# Altium schematic symbol library 2450AT18D0100001E.SchLib: 1 symbol
Pins are listed as number, name and electrical type; pins without a type are passive.

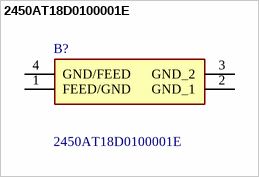
[diagram p0: symbol 2450AT18D0100001E]

## 2450AT18D0100001E
designator B?
2.4GHz Chip RF Antenna 2.4GHz ~ 2.5GHz 1.5dBi Solder Surface Mount; Manufacturer_Name: JOHANSON TECHNOLOGY; Geometry.Height: 1.3mm; Mouser Part Number: 609-2450AT18D0100001; Mouser Price/Stock: https://www.mouser.co.uk/ProductDetail/Johanson-Technology/2450AT18D0100001E?qs=jRuttqqUwMRyzkW5QhJruA%3D%3D; Manufacturer_Part_Number: 2450AT18D0100001E; Datasheet Link: https://www.digikey.ph/en/products/detail/johanson-technology-inc/2450AT18D0100001E/4770685?msockid=39f1ec84d77b6f4428b7f904d6676eed
footprint 2450AT18D0100001E
pins: 1 FEED/GND, 2 GND_1, 3 GND_2, 4 GND/FEED